# Altium schematic symbol library CYRS17B01G.SchLib: 1 symbol
Pins are listed as number, name and electrical type; pins without a type are passive.

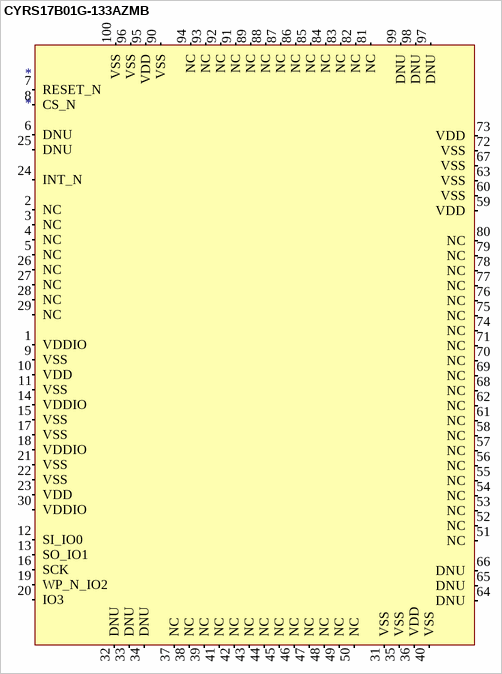
[diagram p0: symbol CYRS17B01G-133AZMB]

## CYRS17B01G-133AZMB
designator *
footprint CYRS17B01G_TQFP100
pins: 1 VDDIO (power) "Alimentación de E/S; 3V3_OBC; VDDIO <= VDD", 2 NC "Sin conexión interna; dejar libre en este diseño", 3 NC "Sin conexión interna; dejar libre en este diseño", 4 NC "Sin conexión interna; dejar libre en este diseño", 5 NC "Sin conexión interna; dejar libre en este diseño", 6 DNU "NO CONECTAR; no utilizar como canal de ruteo", 7 RESET_N (in) "Reset activo en bajo; red NOR_RST_N", 8 CS_N (in) "Selección de chip activa en bajo; NOR_CS_N", 9 VSS (power) "Tierra; conectar a GND", 10 VDD (power) "Alimentación del núcleo; 3V3_OBC", 11 VSS (power) "Tierra; conectar a GND", 12 SI_IO0 (io) "Entrada SPI / línea bidireccional QSPI IO0", 13 SO_IO1 (io) "Salida SPI / línea bidireccional QSPI IO1", 14 VDDIO (power) "Alimentación de E/S; 3V3_OBC; VDDIO <= VDD", 15 VSS (power) "Tierra; conectar a GND", 16 SCK (in) "Reloj SPI/QSPI; NOR_CLK", 17 VSS (power) "Tierra; conectar a GND", 18 VDDIO (power) "Alimentación de E/S; 3V3_OBC; VDDIO <= VDD", 19 WP_N_IO2 (io) "Protección escritura activa en bajo / QSPI IO2", 20 IO3 (io) "Línea bidireccional QSPI IO3", 21 VSS (power) "Tierra; conectar a GND", 22 VSS (power) "Tierra; conectar a GND", 23 VDD (power) "Alimentación del núcleo; 3V3_OBC", 24 INT_N (oc) "Interrupción activa en bajo; salida de drenador abierto", 25 DNU "NO CONECTAR; no utilizar como canal de ruteo", 26 NC "Sin conexión interna; dejar libre en este diseño", 27 NC "Sin conexión interna; dejar libre en este diseño", 28 NC "Sin conexión interna; dejar libre en este diseño", 29 NC "Sin conexión interna; dejar libre en este diseño", 30 VDDIO (power) "Alimentación de E/S; 3V3_OBC; VDDIO <= VDD", 31 VSS (power) "Tierra; conectar a GND", 32 DNU "NO CONECTAR; no utilizar como canal de ruteo", 33 DNU "NO CONECTAR; no utilizar como canal de ruteo", 34 DNU "NO CONECTAR; no utilizar como canal de ruteo", 35 VSS (power) "Tierra; conectar a GND", 36 VDD (power) "Alimentación del núcleo; 3V3_OBC", 37 NC "Sin conexión interna; dejar libre en este diseño", 38 NC "Sin conexión interna; dejar libre en este diseño", 39 NC "Sin conexión interna; dejar libre en este diseño", 40 VSS (power) "Tierra; conectar a GND", 41 NC "Sin conexión interna; dejar libre en este diseño", 42 NC "Sin conexión interna; dejar libre en este diseño", 43 NC "Sin conexión interna; dejar libre en este diseño", 44 NC "Sin conexión interna; dejar libre en este diseño", 45 NC "Sin conexión interna; dejar libre en este diseño", 46 NC "Sin conexión interna; dejar libre en este diseño", 47 NC "Sin conexión interna; dejar libre en este diseño", 48 NC "Sin conexión interna; dejar libre en este diseño", 49 NC "Sin conexión interna; dejar libre en este diseño", 50 NC "Sin conexión interna; dejar libre en este diseño", 51 NC "Sin conexión interna; dejar libre en este diseño", 52 NC "Sin conexión interna; dejar libre en este diseño", 53 NC "Sin conexión interna; dejar libre en este diseño", 54 NC "Sin conexión interna; dejar libre en este diseño", 55 NC "Sin conexión interna; dejar libre en este diseño", 56 NC "Sin conexión interna; dejar libre en este diseño", 57 NC "Sin conexión interna; dejar libre en este diseño", 58 NC "Sin conexión interna; dejar libre en este diseño", 59 VDD (power) "Alimentación del núcleo; 3V3_OBC", 60 VSS (power) "Tierra; conectar a GND", 61 NC "Sin conexión interna; dejar libre en este diseño", 62 NC "Sin conexión interna; dejar libre en este diseño", 63 VSS (power) "Tierra; conectar a GND", 64 DNU "NO CONECTAR; no utilizar como canal de ruteo", 65 DNU "NO CONECTAR; no utilizar como canal de ruteo", 66 DNU "NO CONECTAR; no utilizar como canal de ruteo", 67 VSS (power) "Tierra; conectar a GND", 68 NC "Sin conexión interna; dejar libre en este diseño", 69 NC "Sin conexión interna; dejar libre en este diseño", 70 NC "Sin conexión interna; dejar libre en este diseño", 71 NC "Sin conexión interna; dejar libre en este diseño", 72 VSS (power) "Tierra; conectar a GND", 73 VDD (power) "Alimentación del núcleo; 3V3_OBC", 74 NC "Sin conexión interna; dejar libre en este diseño", 75 NC "Sin conexión interna; dejar libre en este diseño", 76 NC "Sin conexión interna; dejar libre en este diseño", 77 NC "Sin conexión interna; dejar libre en este diseño", 78 NC "Sin conexión interna; dejar libre en este diseño", 79 NC "Sin conexión interna; dejar libre en este diseño", 80 NC "Sin conexión interna; dejar libre en este diseño", 81 NC "Sin conexión interna; dejar libre en este diseño", 82 NC "Sin conexión interna; dejar libre en este diseño", 83 NC "Sin conexión interna; dejar libre en este diseño", 84 NC "Sin conexión interna; dejar libre en este diseño", 85 NC "Sin conexión interna; dejar libre en este diseño", 86 NC "Sin conexión interna; dejar libre en este diseño", 87 NC "Sin conexión interna; dejar libre en este diseño", 88 NC "Sin conexión interna; dejar libre en este diseño", 89 NC "Sin conexión interna; dejar libre en este diseño", 90 VSS (power) "Tierra; conectar a GND", 91 NC "Sin conexión interna; dejar libre en este diseño", 92 NC "Sin conexión interna; dejar libre en este diseño", 93 NC "Sin conexión interna; dejar libre en este diseño", 94 NC "Sin conexión interna; dejar libre en este diseño", 95 VDD (power) "Alimentación del núcleo; 3V3_OBC", 96 VSS (power) "Tierra; conectar a GND", 97 DNU "NO CONECTAR; no utilizar como canal de ruteo", 98 DNU "NO CONECTAR; no utilizar como canal de ruteo", 99 DNU "NO CONECTAR; no utilizar como canal de ruteo", 100 VSS (power) "Tierra; conectar a GND"